# EAGLE library part TDA7021 (library madhu)
Philips TDA7021 FM Radio for MTS
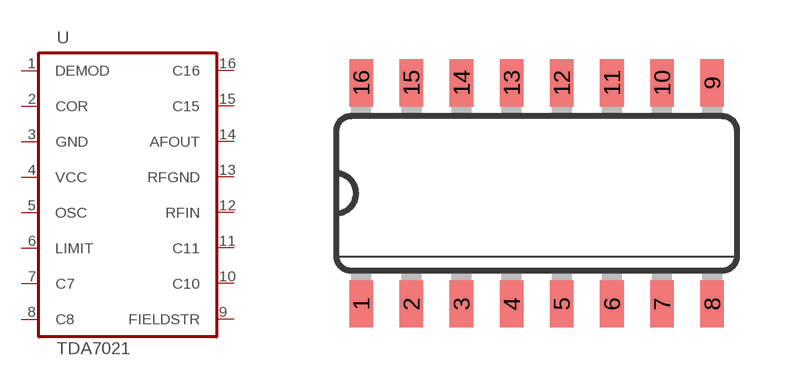
[diagram p17: symbol with the pads of SOIC-16; footprint SOIC-16]

Designator prefix U

## TDA7021T  [SOIC-16]
1  DEMOD
2  COR
3  GND
4  VCC  pwr
5  OSC
6  LIMIT
7  C7
8  C8
9  FIELDSTR
10  C10
11  C11
12  RFIN  in
13  RFGND  in
14  AFOUT  out
15  C15
16  C16

## Footprint SOIC-16 (pad centres in mm)
Small Outline package 150 mil
smd 0.6 x 1.2: 1 -4.445,-2.8; 2 -3.175,-2.8; 3 -1.905,-2.8; 4 -0.635,-2.8; 5 0.635,-2.8; 6 1.905,-2.8; 7 3.175,-2.8; 8 4.445,-2.8; 9 4.445,2.8; 10 3.175,2.8; 11 1.905,2.8; 12 0.635,2.8; 13 -0.635,2.8; 14 -1.905,2.8; 15 -3.175,2.8; 16 -4.445,2.8